# Altium schematic symbol library pwm-controller-board.SchLib: 15 symbols
Pins are listed as number, name and electrical type; pins without a type are passive.

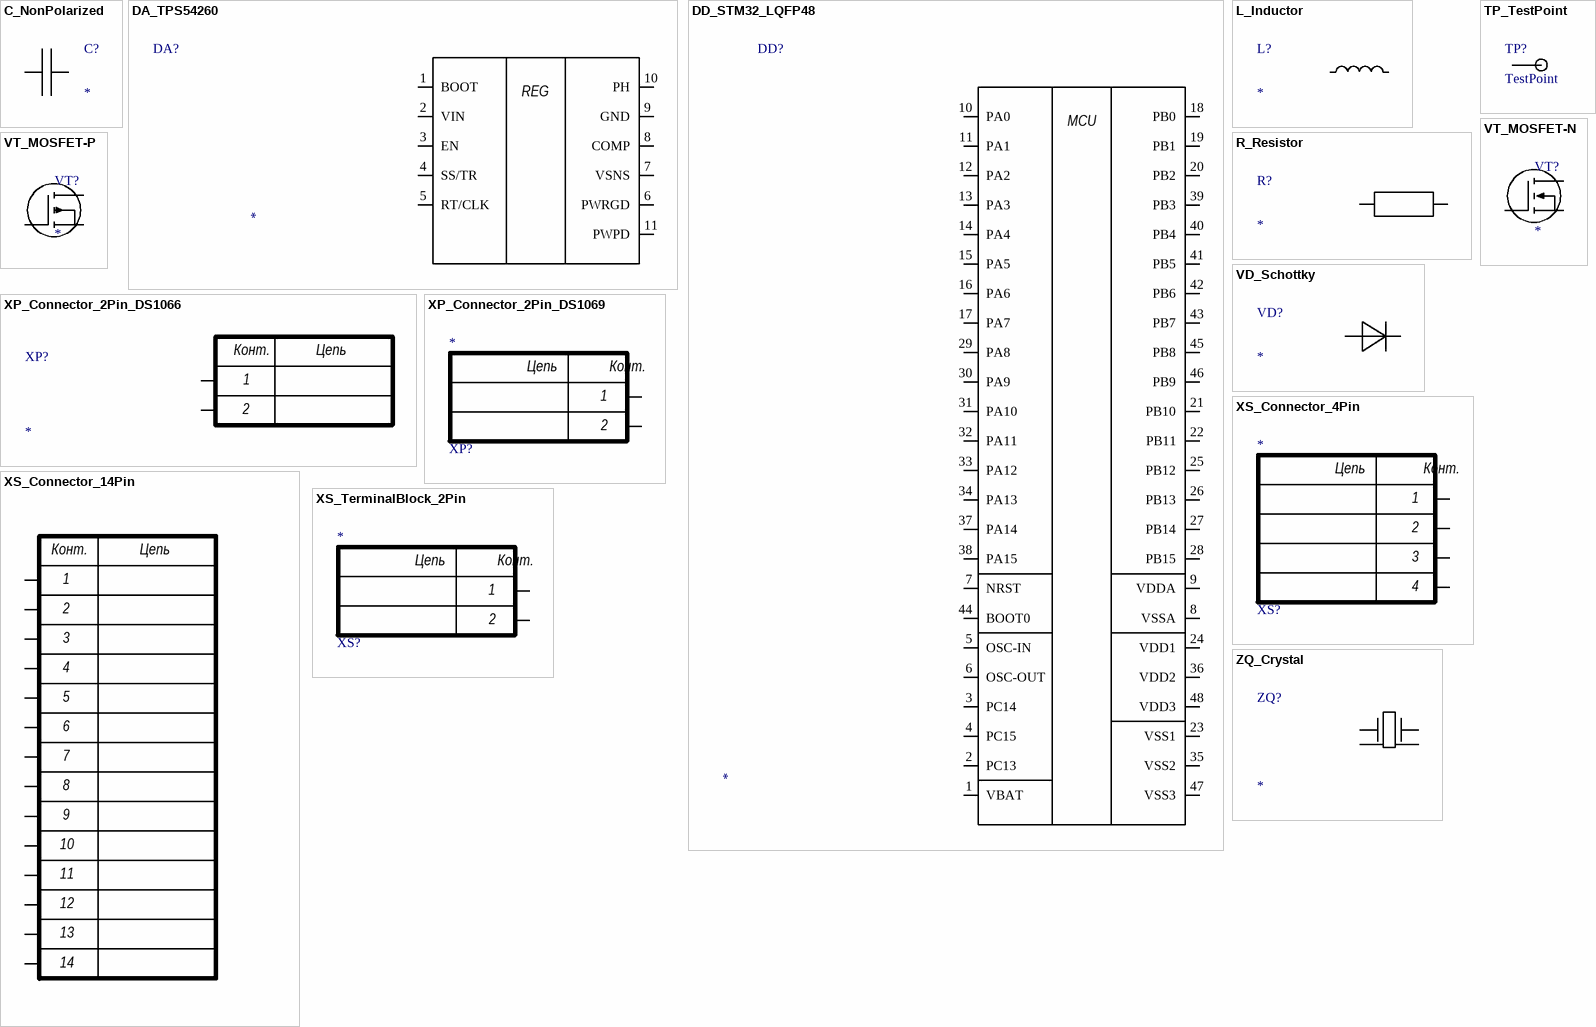
[diagram p0: symbols C_NonPolarized to ZQ_Crystal]

## C_NonPolarized
designator C?
Non-polarized capacitor; Manufacturer: *; Part Number: *; Value: *; Case: *; Case Type: SMD
footprint C_0603 (Non-polarized capacitor, 0603 (1608 metric))
footprint C_0805 (Non-polarized capacitor, 0805 (2012 metric))
footprint C_1210 (Non-polarized capacitor, 1210 (3225 metric))
pins: 1, 2

## DA_TPS54260
designator DA?
TPS54260 step-down switching regulator, HVSSOP-10; Manufacturer: *; Part Number: *; Value: *; Case: *; Case Type: SMD
footprint DA_HVSSOP-10_DGQ (HVSSOP-10 with exposed pad, TI DGQ package)
pins: 1 BOOT, 2 VIN, 3 EN, 4 SS/TR, 5 RT/CLK, 6 PWRGD, 7 VSNS, 8 COMP, 9 GND, 10 PH, 11 PWPD
text: REG

## DD_STM32_LQFP48
designator DD?
STM32 microcontroller, LQFP-48 package; Case: *; Case Type: SMD; Manufacturer: *; Part Number: *; Value: *
footprint DD_LQFP-48_STM32 (STM32 microcontroller, LQFP-48 package)
pins: 1 VBAT, 2 PC13, 3 PC14, 4 PC15, 5 OSC-IN, 6 OSC-OUT, 7 NRST, 8 VSSA, 9 VDDA, 10 PA0, 11 PA1, 12 PA2, 13 PA3, 14 PA4, 15 PA5, 16 PA6, 17 PA7, 18 PB0, 19 PB1, 20 PB2, 21 PB10, 22 PB11, 23 VSS1, 24 VDD1, 25 PB12, 26 PB13, 27 PB14, 28 PB15, 29 PA8, 30 PA9, 31 PA10, 32 PA11, 33 PA12, 34 PA13, 35 VSS2, 36 VDD2, 37 PA14, 38 PA15, 39 PB3, 40 PB4, 41 PB5, 42 PB6, 43 PB7, 44 BOOT0, 45 PB8, 46 PB9, 47 VSS3, 48 VDD3
text: MCU

## L_Inductor
designator L?
Inductor; Manufacturer: *; Part Number: *; Value: *; Case: *; Case Type: SMD
footprint L_MSS1260 (Shielded power inductor, Coilcraft MSS1260 series)
pins: 1, 1, 2, 2

## R_Resistor
designator R?
Fixed resistor; Manufacturer: *; Part Number: *; Value: *; Case: *; Case Type: SMD
footprint R_0603 (Fixed resistor, 0603 (1608 metric))
pins: 1, 2

## TP_TestPoint
designator TP?, comment TestPoint  (no BOM)
Test point; Value: TestPoint
footprint TP_TestPoint (PCB test point)
pins: 1

## VD_Schottky
designator VD?
Schottky diode; pin 1 anode, pin 2 cathode; Manufacturer: *; Part Number: *; Value: *; Case: *; Case Type: SMD
footprint VD_DO-214AC_SMA (Schottky diode, DO-214AC (SMA); pin 1 anode, pin 2 cathode)
pins: 1, 2

## VT_MOSFET-N
designator VT?
N-channel MOSFET; pins G gate, S source, D drain; Manufacturer: *; Part Number: *; Value: *; Case: *; Case Type: SMD
footprint VT_SOT-23 (MOSFET, SOT-23; pins G gate, S source, D drain)
pins: D, G, S

## VT_MOSFET-P
designator VT?
P-channel MOSFET; pins G gate, S source, D drain; Manufacturer: *; Part Number: *; Value: *; Case: *; Case Type: SMD
footprint VT_SOT-23 (MOSFET, SOT-23; pins G gate, S source, D drain)
pins: D, G, S

## XP_Connector_2Pin_DS1066
designator XP?
2-pin connector, DS1066 series; Case: *; Case Type: THT; Manufacturer: *; Part Number: *; Value: *
footprint X_DS1066_2Pin (2-pin connector, Connfly DS1066-02M)
pins: 1, 2
text: Конт.; Цепь

## XP_Connector_2Pin_DS1069
designator XP?
2-pin connector, DS1069 series; Case: *; Case Type: THT; Manufacturer: *; Part Number: *; Value: *
footprint X_DS1069_2Pin (2-pin connector, Connfly DS1069-2 M)
pins: 1, 2
text: Цепь; Конт.

## XS_Connector_4Pin
designator XS?
4-pin connector; Case: *; Case Type: THT; Manufacturer: *; Part Number: *; Value: *
footprint X_DS1021_1x4 (4-pin straight header, Connfly DS-1021-1x4)
pins: 1, 2, 3, 4
text: Цепь; Конт.

## XS_Connector_14Pin
designator XS?
14-pin connector; Case: *; Case Type: THT; Manufacturer: *; Part Number: *; Value: *
footprint X_DS1022_1x14R (14-pin right-angle header, Connfly DS1022-1x14R)
pins: 1, 2, 3, 4, 5, 6, 7, 8, 9, 10, 11, 12, 13, 14
text: Конт.; Цепь

## XS_TerminalBlock_2Pin
designator XS?
2-pin screw terminal block; Manufacturer: *; Part Number: *; Value: *; Case: *; Case Type: THT
footprint X_DG127_2Pin_5.08mm (2-pin screw terminal block, Degson DG127, 5.08 mm pitch)
pins: 1, 2
text: Цепь; Конт.

## ZQ_Crystal
designator ZQ?
Quartz crystal; pins 1/3 crystal, 2/4 metal case; Manufacturer: *; Part Number: *; Value: *; Case: *; Case Type: SMD
footprint ZQ_2016_4Pin (Quartz crystal, CTS 402W, 2.0 x 1.6 mm; pins 1/3 crystal, 2/4 case)
pins: 1, 2, 3, 4